# Altium footprint library PcbLib1.PcbLib: 335 footprints (part 14 of 22)
Each footprint in its own frame and in the unit in brackets; x right, y up, seen from the top. Pads: shape width x height; smd on the part's side, far side on the other; paste and mask are expansions set on the pad; w line width, h text height; cw(c..) or ccw(c..) is an arc to the next point about the centre after c.
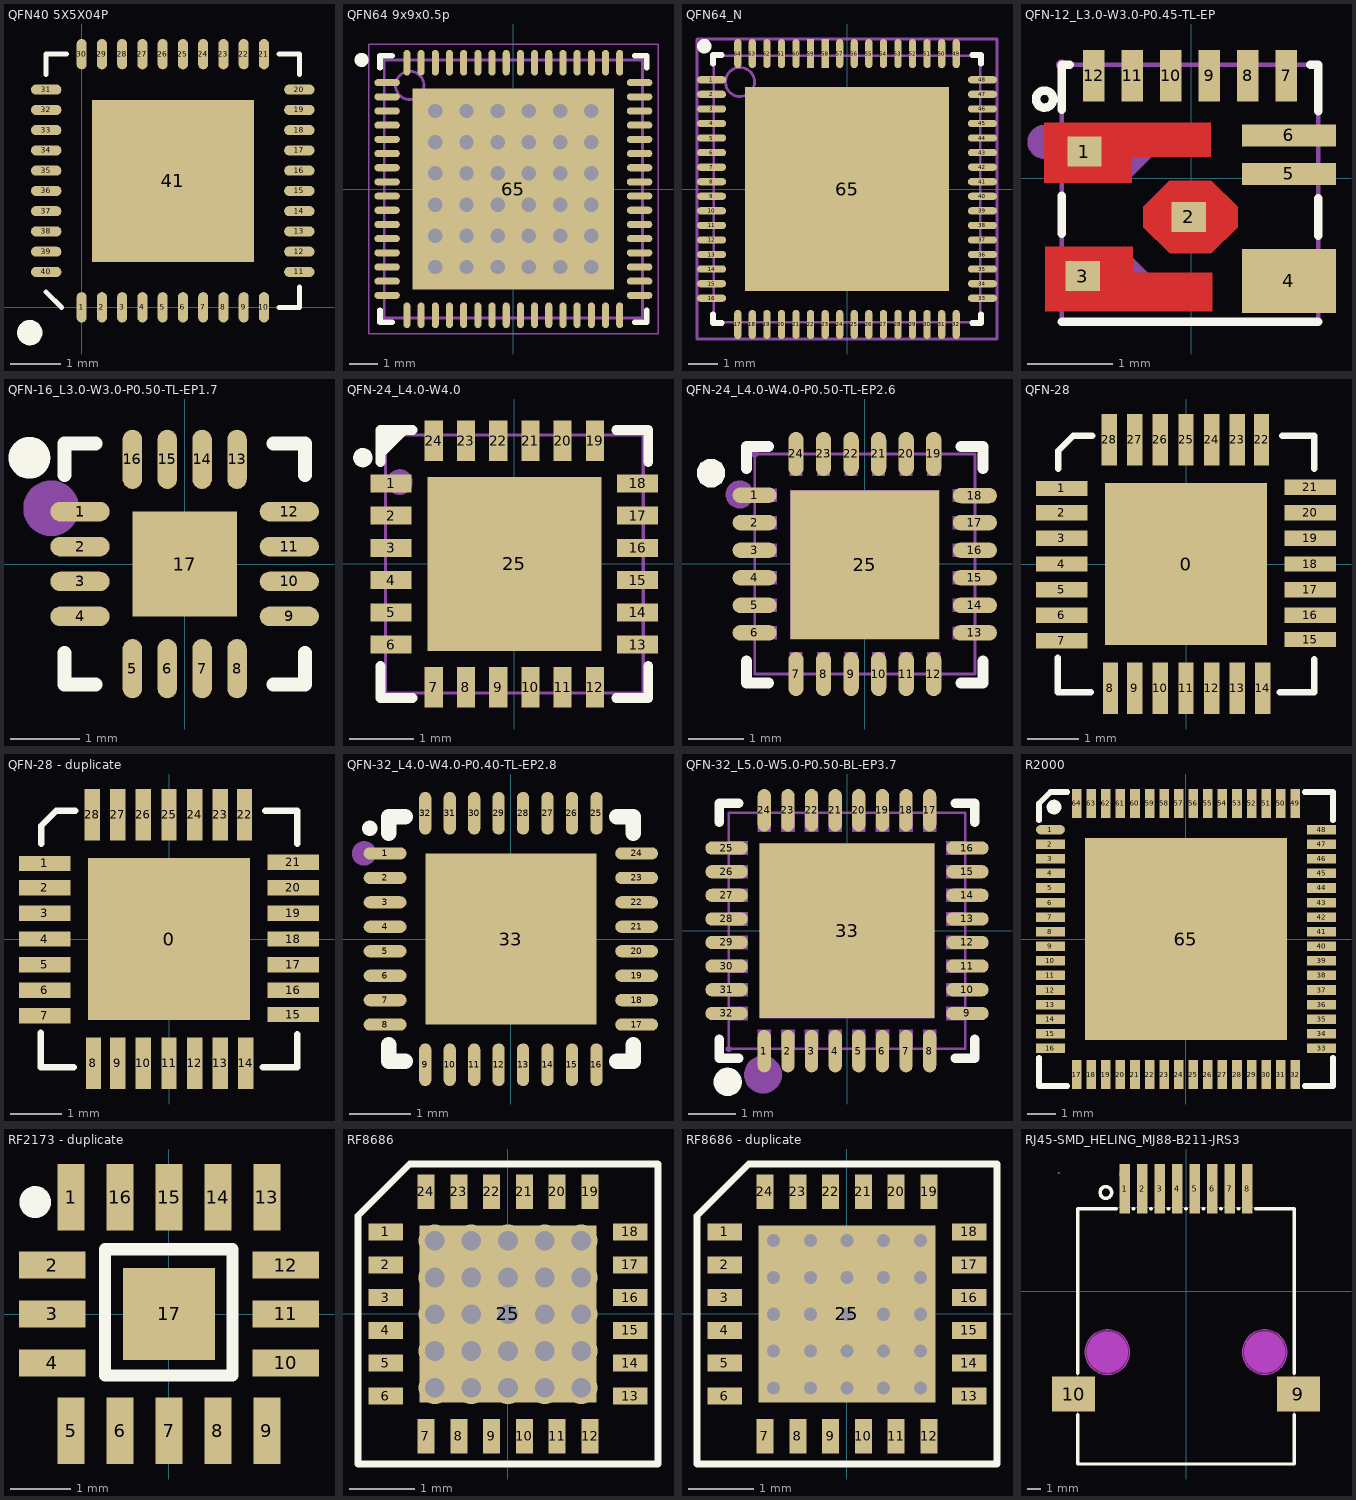
[diagram p13: the footprints below, top view; thin cyan lines are the x and y axes]

## QFN40 5X5X04P [mm] "FM15F336"
pads (41):
  oval 0.2x0.6 smd: 1(0,0) 2(0.4,0) 3(0.8,0) 4(1.2,0) 5(1.6,0) 6(2,0) 7(2.4,0) 8(2.8,0) 9(3.2,0) 10(3.6,0) 21(3.6,5) 22(3.2,5) 23(2.8,5) 24(2.4,5) 25(2,5) 26(1.6,5) 27(1.2,5) 28(0.8,5) 29(0.4,5) 30(0,5)
  oval 0.6x0.2 smd: 11(4.3,0.7) 12(4.3,1.1) 13(4.3,1.5) 14(4.3,1.9) 15(4.3,2.3) 16(4.3,2.7) 17(4.3,3.1) 18(4.3,3.5) 19(4.3,3.9) 20(4.3,4.3) 31(-0.7,4.3) 32(-0.7,3.9) 33(-0.7,3.5) 34(-0.7,3.1) 35(-0.7,2.7) 36(-0.7,2.3) 37(-0.7,1.9) 38(-0.7,1.5) 39(-0.7,1.1) 40(-0.7,0.7)
  rect 3.2x3.2 smd: 41(1.8,2.5)
Top Overlay:
  circle w0.25: c-1.025,-0.5 r0.125
  lines w0.1: -0.7,0.3 -0.4,0 ; -0.7,4.6 -0.7,5 -0.3,5 ; 3.9,0 4.3,0 4.3,0.4 ; 3.9,5 4.3,5 4.3,4.6
3D body: height 1, standoff 0, extent -0.686,0 4.293,4.978

## QFN64 9x9x0.5p [mm] "QFN, 64-Leads, Body 9.00x9.00mm, Pitch 0.50mm, Thermal Pad 7.10x7.10mm, IPC Medium Density"
height 0.8
pads (65):
  oval 0.9x0.25 smd: 1(-4.45,3.75) 2(-4.45,3.25) 3(-4.45,2.75) 4(-4.45,2.25) 5(-4.45,1.75) 6(-4.45,1.25) 7(-4.45,0.75) 8(-4.45,0.25) 9(-4.45,-0.25) 10(-4.45,-0.75) 11(-4.45,-1.25) 12(-4.45,-1.75) 13(-4.45,-2.25) 14(-4.45,-2.75) 15(-4.45,-3.25) 16(-4.45,-3.75) 33(4.45,-3.75) 34(4.45,-3.25) 35(4.45,-2.75) 36(4.45,-2.25) 37(4.45,-1.75) 38(4.45,-1.25) 39(4.45,-0.75) 40(4.45,-0.25) 41(4.45,0.25) 42(4.45,0.75) 43(4.45,1.25) 44(4.45,1.75) 45(4.45,2.25) 46(4.45,2.75) 47(4.45,3.25) 48(4.45,3.75)
  oval 0.25x0.9 smd: 17(-3.75,-4.45) 18(-3.25,-4.45) 19(-2.75,-4.45) 20(-2.25,-4.45) 21(-1.75,-4.45) 22(-1.25,-4.45) 23(-0.75,-4.45) 24(-0.25,-4.45) 25(0.25,-4.45) 26(0.75,-4.45) 27(1.25,-4.45) 28(1.75,-4.45) 29(2.25,-4.45) 30(2.75,-4.45) 31(3.25,-4.45) 32(3.75,-4.45) 49(3.75,4.45) 50(3.25,4.45) 51(2.75,4.45) 52(2.25,4.45) 53(1.75,4.45) 54(1.25,4.45) 55(0.75,4.45) 56(0.25,4.45) 57(-0.25,4.45) 58(-0.75,4.45) 59(-1.25,4.45) 60(-1.75,4.45) 61(-2.25,4.45) 62(-2.75,4.45) 63(-3.25,4.45) 64(-3.75,4.45)
  rect 7.1x7.1 smd: 65(0,0)
via 2.75,-2.75 diameter 0.762 hole 0.508
via 1.65,-2.75 diameter 0.762 hole 0.508
via 0.55,-2.75 diameter 0.762 hole 0.508
via -0.55,-2.75 diameter 0.762 hole 0.508
via -1.65,-2.75 diameter 0.762 hole 0.508
via -2.75,-2.75 diameter 0.762 hole 0.508
via 2.75,-1.65 diameter 0.762 hole 0.508
via 1.65,-1.65 diameter 0.762 hole 0.508
via 0.55,-1.65 diameter 0.762 hole 0.508
via -0.55,-1.65 diameter 0.762 hole 0.508
via -1.65,-1.65 diameter 0.762 hole 0.508
via -2.75,-1.65 diameter 0.762 hole 0.508
via 2.75,-0.55 diameter 0.762 hole 0.508
via 1.65,-0.55 diameter 0.762 hole 0.508
via 0.55,-0.55 diameter 0.762 hole 0.508
via -0.55,-0.55 diameter 0.762 hole 0.508
via -1.65,-0.55 diameter 0.762 hole 0.508
via -2.75,-0.55 diameter 0.762 hole 0.508
via 2.75,0.55 diameter 0.762 hole 0.508
via 1.65,0.55 diameter 0.762 hole 0.508
via 0.55,0.55 diameter 0.762 hole 0.508
via -0.55,0.55 diameter 0.762 hole 0.508
via -1.65,0.55 diameter 0.762 hole 0.508
via -2.75,0.55 diameter 0.762 hole 0.508
via 2.75,1.65 diameter 0.762 hole 0.508
via 1.65,1.65 diameter 0.762 hole 0.508
via 0.55,1.65 diameter 0.762 hole 0.508
via -0.55,1.65 diameter 0.762 hole 0.508
via -1.65,1.65 diameter 0.762 hole 0.508
via -2.75,1.65 diameter 0.762 hole 0.508
via 2.75,2.75 diameter 0.762 hole 0.508
via 1.65,2.75 diameter 0.762 hole 0.508
via 0.55,2.75 diameter 0.762 hole 0.508
via -0.55,2.75 diameter 0.762 hole 0.508
via -1.65,2.75 diameter 0.762 hole 0.508
via -2.75,2.75 diameter 0.762 hole 0.508
Top Overlay:
  circle w0.25: c-5.35,4.55 r0.125
  lines w0.2: -4.7,-4.275 -4.7,-4.7 -4.275,-4.7 ; -4.7,4.275 -4.7,4.7 -4.275,4.7 ; 4.275,-4.7 4.7,-4.7 4.7,-4.275 ; 4.275,4.7 4.7,4.7 4.7,4.275
Mechanical 13:
  circle w0.1: c-3.65,3.65 r0.5
  lines w0.1: -4.55,-4.55 4.55,-4.55 4.55,4.55 -4.55,4.55 -4.55,-4.55
Mechanical 15:
  lines w0.05: -5.1,-5.1 5.1,-5.1 5.1,5.1 -5.1,5.1 -5.1,-5.1
  lines w0.1: -0.5,0 0.5,0 ; 0,-0.5 0,0.5
3D body "QFN50P900X900X80_HS-65N.step": height 0.8, standoff 0, extent -4.551,-4.551 4.551,4.551

## QFN64_N [mm]
pads (65):
  oval 1x0.25 smd: 1(-4.65,3.75) 2(-4.65,3.25) 3(-4.65,2.75) 4(-4.65,2.25) 5(-4.65,1.75) 6(-4.65,1.25) 7(-4.65,0.75) 8(-4.65,0.25) 9(-4.65,-0.25) 10(-4.65,-0.75) 11(-4.65,-1.25) 12(-4.65,-1.75) 13(-4.65,-2.25) 14(-4.65,-2.75) 15(-4.65,-3.25) 16(-4.65,-3.75) 33(4.65,-3.75) 34(4.65,-3.25) 35(4.65,-2.75) 36(4.65,-2.25) 37(4.65,-1.75) 38(4.65,-1.25) 39(4.65,-0.75) 40(4.65,-0.25) 41(4.65,0.25) 42(4.65,0.75) 43(4.65,1.25) 44(4.65,1.75) 45(4.65,2.25) 46(4.65,2.75) 47(4.65,3.25) 48(4.65,3.75)
  oval 0.25x1 smd: 17(-3.75,-4.65) 18(-3.25,-4.65) 19(-2.75,-4.65) 20(-2.25,-4.65) 21(-1.75,-4.65) 22(-1.25,-4.65) 23(-0.75,-4.65) 24(-0.25,-4.65) 25(0.25,-4.65) 26(0.75,-4.65) 27(1.25,-4.65) 28(1.75,-4.65) 29(2.25,-4.65) 30(2.75,-4.65) 31(3.25,-4.65) 32(3.75,-4.65) 49(3.75,4.65) 50(3.25,4.65) 51(2.75,4.65) 52(2.25,4.65) 53(1.75,4.65) 54(1.25,4.65) 55(0.75,4.65) 56(0.25,4.65) 57(-0.25,4.65) 60(-1.75,4.65) 61(-2.25,4.65) 62(-2.75,4.65) 63(-3.25,4.65) 64(-3.75,4.65)
  rect 0.25x1 smd: 58(-0.75,4.65) 59(-1.25,4.65)
  rect 7x7 smd: 65(0,0)
Top Overlay:
  circle w0.25: c-4.901,4.903 r0.125
  lines w0.2: -4.6,-4.3 -4.6,-4.6 -4.3,-4.6 ; -4.6,4.3 -4.6,4.6 -4.3,4.6 ; 4.3,-4.6 4.6,-4.6 4.6,-4.3 ; 4.3,4.6 4.6,4.6 4.6,4.3
Mechanical 13:
  circle w0.1: c-3.675,3.675 r0.5
  lines w0.1: -4.575,-4.575 -4.575,4.575 4.575,4.575 4.575,-4.575 -4.575,-4.575
Mechanical 15:
  lines w0.1: -0.5,0 0.5,0 ; 0,-0.5 0,0.5 ; -5.15,-5.15 -5.15,5.15 5.15,5.15 5.15,-5.15 -5.15,-5.15

## QFN-12_L3.0-W3.0-P0.45-TL-EP [mm]
pads (12):
  rect 0.4x0.35 smd mask+0.051: 1(-1.25,0.313) 2(-0.03,-0.449) 3(-1.27,-1.143)
  rect 1.1x0.75 smd paste-100 mask+0.05: 4(1.14,-1.198)
  rect 1.1x0.26 smd paste-100 mask+0.05: 5(1.14,0.052) 6(1.14,0.502)
  rect 0.25x0.6 smd paste-100 mask+0.05: 7(1.109,1.201) 8(0.66,1.201) 9(0.21,1.201) 10(-0.241,1.201) 11(-0.69,1.201) 12(-1.14,1.201)
Top Layer:
  region: -1.72,0.65 0.229,0.65 0.229,0.251 -0.699,0.251 -0.699,-0.051 -1.721,-0.051 -1.721,0.249
  region: -1.706,-1.551 0.243,-1.551 0.243,-1.103 -0.685,-1.103 -0.685,-0.8 -1.707,-0.8 -1.707,-1.15
  region: -0.256,-0.025 0.235,-0.025 0.54,-0.33 0.54,-0.571 0.235,-0.875 -0.254,-0.875 -0.56,-0.57 -0.56,-0.33 -0.267,-0.038
Top Overlay:
  circle w0.1: c-1.715,0.927 r0.1
  lines w0.1: -1.515,-1.673 1.485,-1.673 ; -1.515,-0.645 -1.515,-0.206 ; -1.515,0.804 -1.515,1.327 -1.42,1.327 ; 1.389,1.327 1.485,1.327 1.485,0.786 ; 1.485,-0.669 1.485,-0.232
Top Paste:
  region: -1.265,1.501 -1.015,1.501 -1.015,0.901 -1.265,0.901
  region: -0.815,1.501 -0.565,1.501 -0.565,0.901 -0.815,0.901
  region: -0.365,1.501 -0.115,1.501 -0.115,0.901 -0.365,0.901
  region: 0.085,1.501 0.335,1.501 0.335,0.901 0.085,0.901
  region: 0.535,1.501 0.785,1.501 0.785,0.901 0.535,0.901
  region: 0.985,1.501 1.235,1.501 1.235,0.901 0.985,0.901
  region: -1.72,0.65 0.229,0.65 0.229,0.251 -0.699,0.251 -0.699,-0.051 -1.721,-0.051 -1.721,0.249
  region: -1.706,-1.551 0.243,-1.551 0.243,-1.103 -0.685,-1.103 -0.684,-0.864 -0.804,-0.799 -1.706,-0.8 -1.706,-1.15
  region: 0.711,0.632 1.691,0.632 1.691,0.372 0.711,0.372
  region: 0.711,0.182 1.691,0.182 1.691,-0.078 0.711,-0.078
  region: 0.711,-0.823 1.691,-0.823 1.691,-1.573 0.711,-1.573
  region: -0.206,-0.11 0.186,-0.11 0.43,-0.354 0.43,-0.547 0.186,-0.79 -0.206,-0.79 -0.45,-0.546 -0.45,-0.354 -0.216,-0.12
Mechanical 6:
  circle w0.2: c-1.715,0.427 r0.1
Mechanical 15:
  region: -1.461,1.327 -1.461,1.352 -1.496,1.387 -1.546,1.387 -1.581,1.352 -1.581,1.327 -1.581,1.302 -1.546,1.267 -1.496,1.267 -1.461,1.302 -1.461,1.327
  region: 1.01,1.327 1.21,1.327 1.21,0.927 1.01,0.927
  region: 0.56,1.327 0.76,1.327 0.76,0.927 0.56,0.927
  region: 0.11,1.327 0.31,1.327 0.31,0.927 0.11,0.927
  region: -0.34,1.327 -0.14,1.327 -0.14,0.927 -0.34,0.927
  region: -0.79,1.327 -0.59,1.327 -0.59,0.927 -0.79,0.927
  region: -1.24,1.327 -1.04,1.327 -1.04,0.927 -1.24,0.927
  region: -0.243,-0.046 0.223,-0.046 0.512,-0.336 0.512,-0.565 0.223,-0.854 -0.242,-0.854 -0.532,-0.564 -0.532,-0.336 -0.254,-0.058
  region: 0.635,-0.898 1.485,-0.898 1.485,-1.498 0.635,-1.498
  region: 0.635,0.602 1.485,0.602 1.485,0.402 0.635,0.402
  region: 0.635,0.152 1.485,0.152 1.485,-0.048 0.635,-0.048
  region: 0.132,0.602 -1.517,0.602 -1.517,0 -0.716,0 -0.417,0.299 0.133,0.299 0.133,0.303
  region: 0.134,-1.5 -1.515,-1.5 -1.515,-0.898 -0.714,-0.898 -0.416,-1.197 0.134,-1.197 0.134,-1.201
  lines w0.051: -1.515,-1.673 -1.515,1.327 1.485,1.327 1.485,-1.673 -1.515,-1.673

## QFN-16_L3.0-W3.0-P0.50-TL-EP1.7 [mm]
pads (18):
  oval 0.85x0.28 smd: 1(-1.5,0.75) 2(-1.5,0.25) 3(-1.5,-0.25) 4(-1.5,-0.75) 9(1.5,-0.75) 10(1.5,-0.25) 11(1.5,0.25) 12(1.5,0.75)
  oval 0.28x0.85 smd: 5(-0.75,-1.5) 6(-0.25,-1.5) 7(0.25,-1.5) 8(0.75,-1.5) 13(0.75,1.5) 14(0.25,1.5) 15(-0.25,1.5) 16(-0.75,1.5)
  round 0 smd: 17(0,0)
  rect 1.5x1.5 smd: 17(0,0)
Top Overlay:
  lines w0.2: -1.725,-1.275 -1.725,-1.725 -1.275,-1.725 ; -1.725,1.275 -1.725,1.725 -1.275,1.725 ; 1.275,-1.725 1.725,-1.725 1.725,-1.275 ; 1.275,1.725 1.725,1.725 1.725,1.275
  lines w0.3: -2.075,1.522 cw(c-2.225,1.523) -2.075,1.524
Mechanical 15:
  circle w0.4: c-1.914,0.799 r0.2
3D body "RF5110GTR7.stp": height 0.9, standoff 0, extent -1.55,-1.55 1.55,1.55

## QFN-24_L4.0-W4.0 [mm]
pads (25):
  rect 0.633x0.28 smd paste-100 mask+0.051: 1(-1.912,1.25) 2(-1.912,0.75) 3(-1.912,0.25) 4(-1.912,-0.25) 5(-1.912,-0.75) 6(-1.912,-1.25) 13(1.912,-1.25) 14(1.912,-0.75) 15(1.912,-0.25) 16(1.912,0.25) 17(1.912,0.75) 18(1.912,1.25)
  rect 0.28x0.633 smd paste-100 mask+0.051: 7(-1.25,-1.912) 8(-0.75,-1.912) 9(-0.25,-1.912) 10(0.25,-1.912) 11(0.75,-1.912) 12(1.25,-1.912) 19(1.25,1.912) 20(0.75,1.912) 21(0.25,1.912) 22(-0.25,1.912) 23(-0.75,1.912) 24(-1.25,1.912)
  rect 2.7x2.7 smd paste-100 mask+0.051: 25(0,0)
Top Overlay:
  circle w0.15: c-2.35,1.65 r0.075
  region: -1.58,2.076 -2.076,2.076 -2.076,1.7
  lines w0.152: -2.076,-1.58 -2.076,-2.076 -1.58,-2.076 ; -2.076,1.58 -2.076,2.076 -1.58,2.076 -1.713,2.076 -2.076,1.713 ; 1.58,-2.076 2.076,-2.076 2.076,-1.58 ; 1.58,2.076 2.076,2.076 2.076,1.58
Top Paste:
  region: -1.39,2.228 -1.11,2.228 -1.11,1.595 -1.39,1.595
  region: -0.89,2.228 -0.61,2.228 -0.61,1.595 -0.89,1.595
  region: -0.39,2.228 -0.11,2.228 -0.11,1.595 -0.39,1.595
  region: 0.11,2.228 0.39,2.228 0.39,1.595 0.11,1.595
  region: 0.61,2.228 0.89,2.228 0.89,1.595 0.61,1.595
  region: 1.11,2.228 1.39,2.228 1.39,1.595 1.11,1.595
  region: 1.595,1.39 2.228,1.39 2.228,1.11 1.595,1.11
  region: 1.595,0.89 2.228,0.89 2.228,0.61 1.595,0.61
  region: 1.595,0.39 2.228,0.39 2.228,0.11 1.595,0.11
  region: 1.595,-0.11 2.228,-0.11 2.228,-0.39 1.595,-0.39
  region: 1.595,-0.61 2.228,-0.61 2.228,-0.89 1.595,-0.89
  region: 1.595,-1.11 2.228,-1.11 2.228,-1.39 1.595,-1.39
  region: 1.11,-1.595 1.39,-1.595 1.39,-2.228 1.11,-2.228
  region: 0.61,-1.595 0.89,-1.595 0.89,-2.228 0.61,-2.228
  region: 0.11,-1.595 0.39,-1.595 0.39,-2.228 0.11,-2.228
  region: -0.39,-1.595 -0.11,-1.595 -0.11,-2.228 -0.39,-2.228
  region: -0.89,-1.595 -0.61,-1.595 -0.61,-2.228 -0.89,-2.228
  region: -1.39,-1.595 -1.11,-1.595 -1.11,-2.228 -1.39,-2.228
  region: -2.228,-1.11 -1.595,-1.11 -1.595,-1.39 -2.228,-1.39
  region: -2.228,-0.61 -1.595,-0.61 -1.595,-0.89 -2.228,-0.89
  region: -2.228,-0.11 -1.595,-0.11 -1.595,-0.39 -2.228,-0.39
  region: -2.228,0.39 -1.595,0.39 -1.595,0.11 -2.228,0.11
  region: -2.228,0.89 -1.595,0.89 -1.595,0.61 -2.228,0.61
  region: -2.228,1.39 -1.595,1.39 -1.595,1.11 -2.228,1.11
  region: -1.08,1.08 1.08,1.08 1.08,-1.08 -1.08,-1.08
Mechanical 6:
  circle w0.2: c-1.778,1.27 r0.1
Mechanical 15:
  region: -1,1.25 1.25,1.25 1.25,-1.25 -1.25,-1.25 -1.25,1
  region: -1.37,1.62 -1.13,1.62 -1.13,2 -1.37,2
  region: -0.87,1.62 -0.63,1.62 -0.63,2 -0.87,2
  region: -0.37,1.62 -0.13,1.62 -0.13,2 -0.37,2
  region: 0.13,1.62 0.37,1.62 0.37,2 0.13,2
  region: 0.63,1.62 0.87,1.62 0.87,2 0.63,2
  region: 1.13,1.62 1.37,1.62 1.37,2 1.13,2
  region: 2,1.37 1.62,1.37 1.62,1.13 2,1.13
  region: 2,0.87 1.62,0.87 1.62,0.63 2,0.63
  region: 2,0.37 1.62,0.37 1.62,0.13 2,0.13
  region: 2,-0.13 1.62,-0.13 1.62,-0.37 2,-0.37
  region: 2,-0.63 1.62,-0.63 1.62,-0.87 2,-0.87
  region: 2,-1.13 1.62,-1.13 1.62,-1.37 2,-1.37
  region: 1.13,-1.62 1.37,-1.62 1.37,-2 1.13,-2
  region: 0.63,-1.62 0.87,-1.62 0.87,-2 0.63,-2
  region: 0.13,-1.62 0.37,-1.62 0.37,-2 0.13,-2
  region: -0.37,-1.62 -0.13,-1.62 -0.13,-2 -0.37,-2
  region: -0.87,-1.62 -0.63,-1.62 -0.63,-2 -0.87,-2
  region: -1.37,-1.62 -1.13,-1.62 -1.13,-2 -1.37,-2
  region: -2,-1.13 -1.62,-1.13 -1.62,-1.37 -2,-1.37
  region: -2,-0.63 -1.62,-0.63 -1.62,-0.87 -2,-0.87
  region: -2,-0.13 -1.62,-0.13 -1.62,-0.37 -2,-0.37
  region: -2,0.37 -1.62,0.37 -1.62,0.13 -2,0.13
  region: -2,0.87 -1.62,0.87 -1.62,0.63 -2,0.63
  region: -2,1.37 -1.62,1.37 -1.62,1.13 -2,1.13
  region: -1.94,2 -1.94,2.025 -1.975,2.06 -2.025,2.06 -2.06,2.025 -2.06,2 -2.06,1.975 -2.025,1.94 -1.975,1.94 -1.94,1.975 -1.94,2
  lines w0.051: -2,-2 -2,2 2,2 2,-2 -2,-2

## QFN-24_L4.0-W4.0-P0.50-TL-EP2.6 [mm]
pads (25):
  oval 0.8x0.28 smd mask+0.051: 1(-2,1.25) 2(-2,0.75) 3(-2,0.25) 4(-2,-0.25) 5(-2,-0.75) 6(-2,-1.25) 13(2,-1.25) 14(2,-0.75) 15(2,-0.25) 16(2,0.25) 17(2,0.75) 18(2,1.242)
  oval 0.28x0.8 smd mask+0.051: 7(-1.25,-2) 8(-0.75,-2) 9(-0.25,-2) 10(0.25,-2) 11(0.75,-2) 12(1.25,-2) 19(1.25,2) 20(0.75,2) 21(0.25,2) 22(-0.25,2) 23(-0.75,2) 24(-1.25,2)
  rect 2.7x2.7 smd mask+0.051: 25(0,-0.013)
Top Overlay:
  region: -2.792,1.397 -2.724,1.398 -2.607,1.466 -2.539,1.584 -2.54,1.72 -2.608,1.838 -2.726,1.905 -2.861,1.905 -2.979,1.838 -3.047,1.72 -3.048,1.584 -2.98,1.466 -2.863,1.398 -2.795,1.397
  lines w0.2: -2.15,-1.763 -2.15,-2.163 -1.75,-2.163 ; -2.15,1.737 -2.15,2.137 -1.75,2.137 ; 1.75,-2.163 2.15,-2.163 2.15,-1.763 ; 1.75,2.137 2.15,2.137 2.15,1.737
Top Paste:
  drawing of 25 lines, arcs and shapes, not listed
Mechanical 6:
  circle w0.254: c-2.273,1.263 r0.127
Mechanical 15:
  region: 1.135,2 1.365,2 1.365,1.6 1.135,1.6
  region: 0.635,2 0.865,2 0.865,1.6 0.635,1.6
  region: 0.135,2 0.365,2 0.365,1.6 0.135,1.6
  region: -0.365,2 -0.135,2 -0.135,1.6 -0.365,1.6
  region: -0.865,2 -0.635,2 -0.635,1.6 -0.865,1.6
  region: -1.365,2 -1.135,2 -1.135,1.6 -1.365,1.6
  region: -1.6,1.365 -1.6,1.135 -2,1.135 -2,1.365
  region: -1.6,0.865 -1.6,0.635 -2,0.635 -2,0.865
  region: -1.6,0.365 -1.6,0.135 -2,0.135 -2,0.365
  region: -1.6,-0.135 -1.6,-0.365 -2,-0.365 -2,-0.135
  region: -1.6,-0.635 -1.6,-0.865 -2,-0.865 -2,-0.635
  region: -1.6,-1.135 -1.6,-1.365 -2,-1.365 -2,-1.135
  region: -1.365,-1.6 -1.135,-1.6 -1.135,-2 -1.365,-2
  region: -0.865,-1.6 -0.635,-1.6 -0.635,-2 -0.865,-2
  region: -0.365,-1.6 -0.135,-1.6 -0.135,-2 -0.365,-2
  region: 0.135,-1.6 0.365,-1.6 0.365,-2 0.135,-2
  region: 0.635,-1.6 0.865,-1.6 0.865,-2 0.635,-2
  region: 1.135,-1.6 1.365,-1.6 1.365,-2 1.135,-2
  region: 2,-1.138 2,-1.368 1.6,-1.368 1.6,-1.138
  region: 2,-0.635 2,-0.865 1.6,-0.865 1.6,-0.635
  region: 2,-0.135 2,-0.365 1.6,-0.365 1.6,-0.135
  region: 2,0.365 2,0.135 1.6,0.135 1.6,0.365
  region: 2,0.865 2,0.635 1.6,0.635 1.6,0.865
  region: 2,1.357 2,1.127 1.6,1.127 1.6,1.357
  region: -1.35,1.337 1.35,1.337 1.35,-1.363 -1.35,-1.363
  region: -1.94,2 -1.94,2.025 -1.975,2.06 -2.025,2.06 -2.06,2.025 -2.06,2 -2.06,1.975 -2.025,1.94 -1.975,1.94 -1.94,1.975 -1.94,2
  lines w0.051: -2,-2 -2,2 2,2 2,-2 -2,-2

## QFN-28 [mm] "cp2102"
height 1.75
pads (29):
  rect 3.15x3.15 smd: 0(0,0)
  rect 1x0.3 smd: 1(-2.425,1.473) 2(-2.425,1) 3(-2.425,0.5) 4(-2.425,0) 5(-2.425,-0.5) 6(-2.425,-1) 7(-2.425,-1.5) 15(2.425,-1.473) 16(2.425,-1) 17(2.425,-0.5) 18(2.425,0) 19(2.425,0.5) 20(2.425,1) 21(2.425,1.5)
  rect 0.3x1 smd: 8(-1.473,-2.425) 9(-1,-2.425) 10(-0.5,-2.425) 11(0,-2.425) 12(0.5,-2.425) 13(1,-2.425) 14(1.5,-2.425) 22(1.473,2.425) 23(1,2.425) 24(0.5,2.425) 25(0,2.425) 26(-0.5,2.425) 27(-1,2.425) 28(-1.5,2.425)
Top Overlay:
  lines w0.127: -2.5,-1.829 -2.5,-2.5 -1.854,-2.5 ; -2.489,1.854 -2.489,2.21 -2.199,2.5 -2.057,2.5 -1.829,2.5 ; 1.829,-2.5 2.5,-2.5 2.5,-1.854 ; 1.88,2.5 1.956,2.5 1.981,2.5 2.032,2.5 2.5,2.5 2.5,1.854

## QFN-28 - duplicate [mm] "cp2102"
pads (29):
  rect 3.15x3.15 smd: 0(0,0)
  rect 1x0.3 smd: 1(-2.425,1.473) 2(-2.425,1) 3(-2.425,0.5) 4(-2.425,0) 5(-2.425,-0.5) 6(-2.425,-1) 7(-2.425,-1.5) 15(2.425,-1.473) 16(2.425,-1) 17(2.425,-0.5) 18(2.425,0) 19(2.425,0.5) 20(2.425,1) 21(2.425,1.5)
  rect 0.3x1 smd: 8(-1.473,-2.425) 9(-1,-2.425) 10(-0.5,-2.425) 11(0,-2.425) 12(0.5,-2.425) 13(1,-2.425) 14(1.5,-2.425) 22(1.473,2.425) 23(1,2.425) 24(0.5,2.425) 25(0,2.425) 26(-0.5,2.425) 27(-1,2.425) 28(-1.5,2.425)
Top Overlay:
  lines w0.127: -2.5,-1.829 -2.5,-2.5 -1.854,-2.5 ; -2.489,1.854 -2.489,2.21 -2.199,2.5 -2.057,2.5 -1.829,2.5 ; 1.829,-2.5 2.5,-2.5 2.5,-1.854 ; 1.88,2.5 1.956,2.5 1.981,2.5 2.032,2.5 2.5,2.5 2.5,1.854

## QFN-32_L4.0-W4.0-P0.40-TL-EP2.8 [mm]
pads (33):
  oval 0.7x0.2 smd paste-100 mask+0.051: 1(-2.057,1.4) 2(-2.057,1) 3(-2.057,0.6) 4(-2.057,0.2) 5(-2.057,-0.2) 6(-2.057,-0.6) 7(-2.057,-1) 8(-2.057,-1.4) 17(2.057,-1.4) 18(2.057,-1) 19(2.057,-0.6) 20(2.057,-0.2) 21(2.057,0.2) 22(2.057,0.6) 23(2.057,1) 24(2.057,1.4)
  oval 0.2x0.7 smd paste-100 mask+0.051: 9(-1.4,-2.057) 10(-1,-2.057) 11(-0.6,-2.057) 12(-0.2,-2.057) 13(0.2,-2.057) 14(0.6,-2.057) 15(1,-2.057) 16(1.4,-2.057) 25(1.4,2.057) 26(1,2.057) 27(0.6,2.057) 28(0.2,2.057) 29(-0.2,2.057) 30(-0.6,2.057) 31(-1,2.057) 32(-1.4,2.057)
  rect 2.8x2.8 smd paste-100 mask+0.051: 33(0,0)
Top Overlay:
  circle w0.25: c-2.309,1.809 r0
  lines w0.254: -2,-1.731 -2,-2 -1.731,-2 ; -2,1.731 -2,2 -1.731,2 ; 1.731,-2 2,-2 2,-1.731 ; 1.731,2 2,2 2,1.731
Top Paste:
  drawing of 33 lines, arcs and shapes, not listed
Mechanical 15:
  circle w0.2: c-2.4,1.4 r0.1

## QFN-32_L5.0-W5.0-P0.50-BL-EP3.7 [mm]
pads (33):
  oval 0.28x0.9 smd paste-100 mask+0.05: 1(-1.75,-2.55) 2(-1.25,-2.55) 3(-0.749,-2.55) 4(-0.249,-2.55) 5(0.249,-2.55) 6(0.749,-2.55) 7(1.25,-2.55) 8(1.75,-2.55) 17(1.75,2.55) 18(1.25,2.55) 19(0.749,2.55) 20(0.249,2.55) 21(-0.249,2.55) 22(-0.749,2.55) 23(-1.25,2.55) 24(-1.75,2.55)
  oval 0.9x0.28 smd paste-100 mask+0.05: 9(2.55,-1.75) 10(2.55,-1.25) 11(2.55,-0.749) 12(2.55,-0.249) 13(2.55,0.249) 14(2.55,0.749) 15(2.55,1.25) 16(2.55,1.75) 25(-2.55,1.75) 26(-2.55,1.25) 27(-2.55,0.749) 28(-2.55,0.249) 29(-2.55,-0.249) 30(-2.55,-0.749) 31(-2.55,-1.25) 32(-2.55,-1.75)
  rect 3.7x3.7 smd paste-100 mask+0.05: 33(0,0)
Top Overlay:
  lines w0.2: -2.7,-2.295 -2.7,-2.7 -2.295,-2.7 ; -2.7,2.295 -2.7,2.7 -2.295,2.7 ; 2.295,-2.7 2.7,-2.7 2.7,-2.295 ; 2.295,2.7 2.7,2.7 2.7,2.295
  lines w0.3: -2.528,-3.05 ccw(c-2.527,-3.2) -2.525,-3.05
Top Paste:
  drawing of 33 lines, arcs and shapes, not listed
Mechanical 6:
  circle w0.4: c-1.778,-3.048 r0.2
Mechanical 15:
  drawing of 38 lines, arcs and shapes, not listed

## R2000 [mm]
pads (65):
  oval 1x0.33 smd: 1(-4.698,3.788)
  rect 1x0.33 smd: 2(-4.698,3.283) 3(-4.698,2.778) 4(-4.698,2.273) 5(-4.698,1.768) 6(-4.698,1.263) 7(-4.698,0.758) 8(-4.698,0.253) 9(-4.698,-0.252) 10(-4.698,-0.757) 11(-4.698,-1.262) 12(-4.698,-1.767) 13(-4.698,-2.272) 14(-4.698,-2.778) 15(-4.698,-3.283) 16(-4.698,-3.788) 33(4.698,-3.788) 34(4.698,-3.283) 35(4.698,-2.778) 36(4.698,-2.272) 37(4.698,-1.767) 38(4.698,-1.262) 39(4.698,-0.757) 40(4.698,-0.252) 41(4.698,0.253) 42(4.698,0.758) 43(4.698,1.263) 44(4.698,1.768) 45(4.698,2.273) 46(4.698,2.778) 47(4.698,3.283) 48(4.698,3.788)
  rect 0.33x1 smd: 17(-3.788,-4.698) 18(-3.283,-4.698) 19(-2.778,-4.698) 20(-2.272,-4.698) 21(-1.767,-4.698) 22(-1.262,-4.698) 23(-0.757,-4.698) 24(-0.252,-4.698) 25(0.253,-4.698) 26(0.758,-4.698) 27(1.263,-4.698) 28(1.768,-4.698) 29(2.273,-4.698) 30(2.778,-4.698) 31(3.283,-4.698) 32(3.788,-4.698) 49(3.788,4.698) 50(3.283,4.698) 51(2.778,4.698) 52(2.273,4.698) 53(1.768,4.698) 54(1.263,4.698) 55(0.758,4.698) 56(0.253,4.698) 57(-0.252,4.698) 58(-0.757,4.698) 59(-1.262,4.698) 60(-1.767,4.698) 61(-2.272,4.698) 62(-2.778,4.698) 63(-3.283,4.698) 64(-3.788,4.698)
  rect 7x7 smd: 65(0,0)
Top Overlay:
  circle w0.254: c-4.572,4.572 r0.127
  lines w0.2: -5.098,-4.118 -5.098,-5.098 -4.118,-5.098 ; -5.098,4.118 -5.098,4.698 -4.698,5.098 -4.118,5.098 ; 4.118,-5.098 5.098,-5.098 5.098,-4.118 ; 4.118,5.098 5.098,5.098 5.098,4.118

## RF2173 - duplicate [mm]
pads (17):
  rect 0.45x1.1 smd: 1(-1.62,1.93) 5(-1.62,-1.93) 6(-0.81,-1.93) 7(0,-1.93) 8(0.81,-1.93) 9(1.62,-1.93) 13(1.62,1.93) 14(0.81,1.93) 15(0,1.93) 16(-0.81,1.93)
  rect 1.1x0.45 smd: 2(-1.93,0.81) 3(-1.93,0) 4(-1.93,-0.81) 10(1.93,-0.81) 11(1.93,0) 12(1.93,0.81)
  rect 1.52x1.52 smd: 17(0,0)
Top Overlay:
  circle w0.3: c-2.213,1.85 r0.113
  lines w0.2: -1.06,-1.02 1.05,-1.02 1.05,1.07 -1.06,1.07 -1.06,-1.02

## RF8686 [mm] "PA"
pads (25):
  rect 0.528x0.26 smd: 1(-1.864,1.25) 2(-1.864,0.75) 3(-1.864,0.25) 4(-1.864,-0.25) 5(-1.864,-0.75) 6(-1.864,-1.25) 13(1.864,-1.25) 14(1.864,-0.75) 15(1.864,-0.25) 16(1.864,0.25) 17(1.864,0.75) 18(1.864,1.25)
  rect 0.26x0.528 smd: 7(-1.25,-1.864) 8(-0.75,-1.864) 9(-0.25,-1.864) 10(0.25,-1.864) 11(0.75,-1.864) 12(1.25,-1.864) 19(1.25,1.864) 20(0.75,1.864) 21(0.25,1.864) 22(-0.25,1.864) 23(-0.75,1.864) 24(-1.25,1.864)
  rect 2.7x2.7 smd: 25(0,0)
via 1.118,1.118 diameter 0.5 hole 0.3
via 0.559,1.118 diameter 0.5 hole 0.3
via 0,1.118 diameter 0.5 hole 0.3
via -0.559,1.118 diameter 0.5 hole 0.3
via -1.118,1.118 diameter 0.5 hole 0.3
via -1.118,0.557 diameter 0.5 hole 0.3
via -0.559,0.557 diameter 0.5 hole 0.3
via 0,0.557 diameter 0.5 hole 0.3
via 0.559,0.557 diameter 0.5 hole 0.3
via 1.118,0.557 diameter 0.5 hole 0.3
via -1.118,-0.004 diameter 0.5 hole 0.3
via -0.559,-0.004 diameter 0.5 hole 0.3
via 0,-0.004 diameter 0.5 hole 0.3
via 0.559,-0.004 diameter 0.5 hole 0.3
via 1.118,-0.004 diameter 0.5 hole 0.3
via -1.118,-0.564 diameter 0.5 hole 0.3
via -0.559,-0.564 diameter 0.5 hole 0.3
via 0,-0.564 diameter 0.5 hole 0.3
via 0.559,-0.564 diameter 0.5 hole 0.3
via 1.118,-0.564 diameter 0.5 hole 0.3
via -1.118,-1.125 diameter 0.5 hole 0.3
via -0.559,-1.125 diameter 0.5 hole 0.3
via 0,-1.125 diameter 0.5 hole 0.3
via 0.559,-1.125 diameter 0.5 hole 0.3
via 1.118,-1.125 diameter 0.5 hole 0.3
Top Overlay:
  lines w0.1: -2.286,-2.286 -2.286,1.499 -1.499,2.286 2.286,2.286 2.286,-2.286 -2.286,-2.286

## RF8686 - duplicate [mm] "PA"
pads (25):
  rect 0.528x0.26 smd: 1(-1.864,1.25) 2(-1.864,0.75) 3(-1.864,0.25) 4(-1.864,-0.25) 5(-1.864,-0.75) 6(-1.864,-1.25) 13(1.864,-1.25) 14(1.864,-0.75) 15(1.864,-0.25) 16(1.864,0.25) 17(1.864,0.75) 18(1.864,1.25)
  rect 0.26x0.528 smd: 7(-1.25,-1.864) 8(-0.75,-1.864) 9(-0.25,-1.864) 10(0.25,-1.864) 11(0.75,-1.864) 12(1.25,-1.864) 19(1.25,1.864) 20(0.75,1.864) 21(0.25,1.864) 22(-0.25,1.864) 23(-0.75,1.864) 24(-1.25,1.864)
  rect 2.7x2.7 smd: 25(0,0)
via 1.118,1.118 diameter 0.4 hole 0.2
via 0.559,1.118 diameter 0.4 hole 0.2
via 0,1.118 diameter 0.4 hole 0.2
via -0.559,1.118 diameter 0.4 hole 0.2
via -1.118,1.118 diameter 0.4 hole 0.2
via -1.118,0.557 diameter 0.4 hole 0.2
via -0.559,0.557 diameter 0.4 hole 0.2
via 0,0.557 diameter 0.4 hole 0.2
via 0.559,0.557 diameter 0.4 hole 0.2
via 1.118,0.557 diameter 0.4 hole 0.2
via -1.118,-0.004 diameter 0.4 hole 0.2
via -0.559,-0.004 diameter 0.4 hole 0.2
via 0,-0.004 diameter 0.4 hole 0.2
via 0.559,-0.004 diameter 0.4 hole 0.2
via 1.118,-0.004 diameter 0.4 hole 0.2
via -1.118,-0.564 diameter 0.4 hole 0.2
via -0.559,-0.564 diameter 0.4 hole 0.2
via 0,-0.564 diameter 0.4 hole 0.2
via 0.559,-0.564 diameter 0.4 hole 0.2
via 1.118,-0.564 diameter 0.4 hole 0.2
via -1.118,-1.125 diameter 0.4 hole 0.2
via -0.559,-1.125 diameter 0.4 hole 0.2
via 0,-1.125 diameter 0.4 hole 0.2
via 0.559,-1.125 diameter 0.4 hole 0.2
via 1.118,-1.125 diameter 0.4 hole 0.2
Top Overlay:
  lines w0.1: -2.286,-2.286 -2.286,1.499 -1.499,2.286 2.286,2.286 2.286,-2.286 -2.286,-2.286

## RJ45-SMD_HELING_MJ88-B211-JRS3 [mm]
pads (10):
  rect 0.76x3.6 smd paste+0 mask+0.05: 1(-4.445,7.46) 2(-3.175,7.46) 3(-1.905,7.46) 4(-0.635,7.46) 5(0.635,7.46) 6(1.905,7.46) 7(3.175,7.46) 8(4.445,7.46)
  rect 3.12x2.54 smd paste+0 mask+0.05: 9(8.175,-7.46) 10(-8.175,-7.46)
Top Overlay:
  circle w0.254: c-5.825,7.19 r0.425
  lines w0.254: -7.87,-8.961 -7.87,-12.54 7.87,-12.54 7.87,-8.961 ; -7.87,-5.959 -7.87,6.02 -5.056,6.02 ; -3.834,6.02 -3.786,6.02 ; -2.564,6.02 -2.516,6.02 ; -1.294,6.02 -1.246,6.02 ; -0.024,6.02 0.024,6.02 ; 1.246,6.02 1.294,6.02 ; 2.516,6.02 2.564,6.02 ; 3.786,6.02 3.834,6.02 ; 5.056,6.02 7.87,6.02 7.87,-5.959
Keep-Out Layer:
  board cut-out: -4.09,-4.41 -4.09,-4.25 -4.152,-3.936 -4.275,-3.64 -4.453,-3.374 -4.679,-3.148 -4.945,-2.97 -5.241,-2.848 -5.555,-2.785 -5.875,-2.785 -6.189,-2.848 -6.485,-2.97 -6.751,-3.148 -6.977,-3.374 -7.155,-3.64 -7.278,-3.936 -7.34,-4.25 -7.34,-4.41 -7.34,-4.57 -7.278,-4.884 -7.155,-5.18 -6.977,-5.446 -6.751,-5.672 -6.485,-5.85 -6.189,-5.973 -5.875,-6.035 -5.555,-6.035 -5.241,-5.973 -4.945,-5.85 -4.679,-5.672 -4.453,-5.446 -4.275,-5.18 -4.152,-4.884 -4.09,-4.57 -4.09,-4.41
  board cut-out: 7.34,-4.41 7.34,-4.25 7.278,-3.936 7.155,-3.64 6.977,-3.374 6.751,-3.148 6.485,-2.97 6.189,-2.848 5.875,-2.785 5.555,-2.785 5.241,-2.848 4.945,-2.97 4.679,-3.148 4.453,-3.374 4.275,-3.64 4.152,-3.936 4.09,-4.25 4.09,-4.41 4.09,-4.57 4.152,-4.884 4.275,-5.18 4.453,-5.446 4.679,-5.672 4.945,-5.85 5.241,-5.973 5.555,-6.035 5.875,-6.035 6.189,-5.973 6.485,-5.85 6.751,-5.672 6.977,-5.446 7.155,-5.18 7.278,-4.884 7.34,-4.57 7.34,-4.41
Mechanical 1:
  circle w0.005: c-5.715,-4.41 r1.625
  circle w0.005: c5.715,-4.41 r1.625
Mechanical 6:
  circle w1.5: c-5.715,-4.41 r0.75
  circle w1.5: c5.715,-4.41 r0.75
  circle w0.4: c-4.47,8.535 r0.2
Mechanical 15:
  region: -9.19,8.61 -9.19,8.635 -9.225,8.67 -9.275,8.67 -9.31,8.635 -9.31,8.61 -9.31,8.585 -9.275,8.55 -9.225,8.55 -9.19,8.585 -9.19,8.61
  region: 4.195,8.61 4.695,8.61 4.695,7.61 4.195,7.61
  region: 2.925,8.61 3.425,8.61 3.425,7.61 2.925,7.61
  region: 1.655,8.61 2.155,8.61 2.155,7.61 1.655,7.61
  region: 0.385,8.61 0.885,8.61 0.885,7.61 0.385,7.61
  region: -0.885,8.61 -0.385,8.61 -0.385,7.61 -0.885,7.61
  region: -2.155,8.61 -1.655,8.61 -1.655,7.61 -2.155,7.61
  region: -3.425,8.61 -2.925,8.61 -2.925,7.61 -3.425,7.61
  region: -4.695,8.61 -4.195,8.61 -4.195,7.61 -4.695,7.61
  region: 4.695,7.615 4.195,7.615 4.195,6.105 4.68,6.105 4.685,6.105
  region: 3.425,7.615 2.925,7.615 2.925,6.105 3.41,6.105 3.415,6.105
  region: 2.155,7.615 1.655,7.615 1.655,6.105 2.14,6.105 2.145,6.105
  region: 0.885,7.615 0.385,7.615 0.385,6.105 0.87,6.105 0.875,6.105
  region: -0.385,7.615 -0.885,7.615 -0.885,6.105 -0.4,6.105 -0.395,6.105
  region: -1.655,7.615 -2.155,7.615 -2.155,6.105 -1.67,6.105 -1.665,6.105
  region: -2.925,7.615 -3.425,7.615 -3.425,6.105 -2.94,6.105 -2.935,6.105
  region: -4.195,7.615 -4.695,7.615 -4.695,6.105 -4.21,6.105 -4.205,6.105
  region: 7.65,-6.66 9.25,-6.66 9.25,-8.26 7.65,-8.26
  region: -9.25,-6.66 -7.65,-6.66 -7.65,-8.26 -9.25,-8.26
  lines w0.051: -7.87,-12.54 -7.87,6.11 7.87,6.11 7.87,-12.54 -7.87,-12.54